# Altium integrated library PTC.IntLib: 1 symbol
Pins are listed as number, name and electrical type; pins without a type are passive.

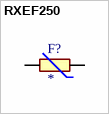
[diagram p0: symbol RXEF250]

## RXEF250
designator F?
Polymeric PTC Resettable Fuse 72V 2.5A Ih Through Hole Radial, Disc; MP: RXEF250; MF: Littelfuse Inc.; SnapEDA_Link: https://www.snapeda.com/parts/RXEF250/Littelfuse%20Inc./view-part/582232/?ref=snap; Price: None; Package: Radial Littelfuse; Availability: In Stock; Check_prices: https://www.snapeda.com/parts/RXEF250/Littelfuse%20Inc./view-part/582232/?ref=eda; Value: *
footprint FUSRB1015W80L2080T300H2450
pins: 1, 2